# Altium footprint library Header2.PcbLib: 108 footprints (part 2 of 7)
Each footprint in its own frame and in the unit in brackets; x right, y up, seen from the top. Pads: shape width x height; smd on the part's side, far side on the other; paste and mask are expansions set on the pad; w line width, h text height; cw(c..) or ccw(c..) is an arc to the next point about the centre after c.
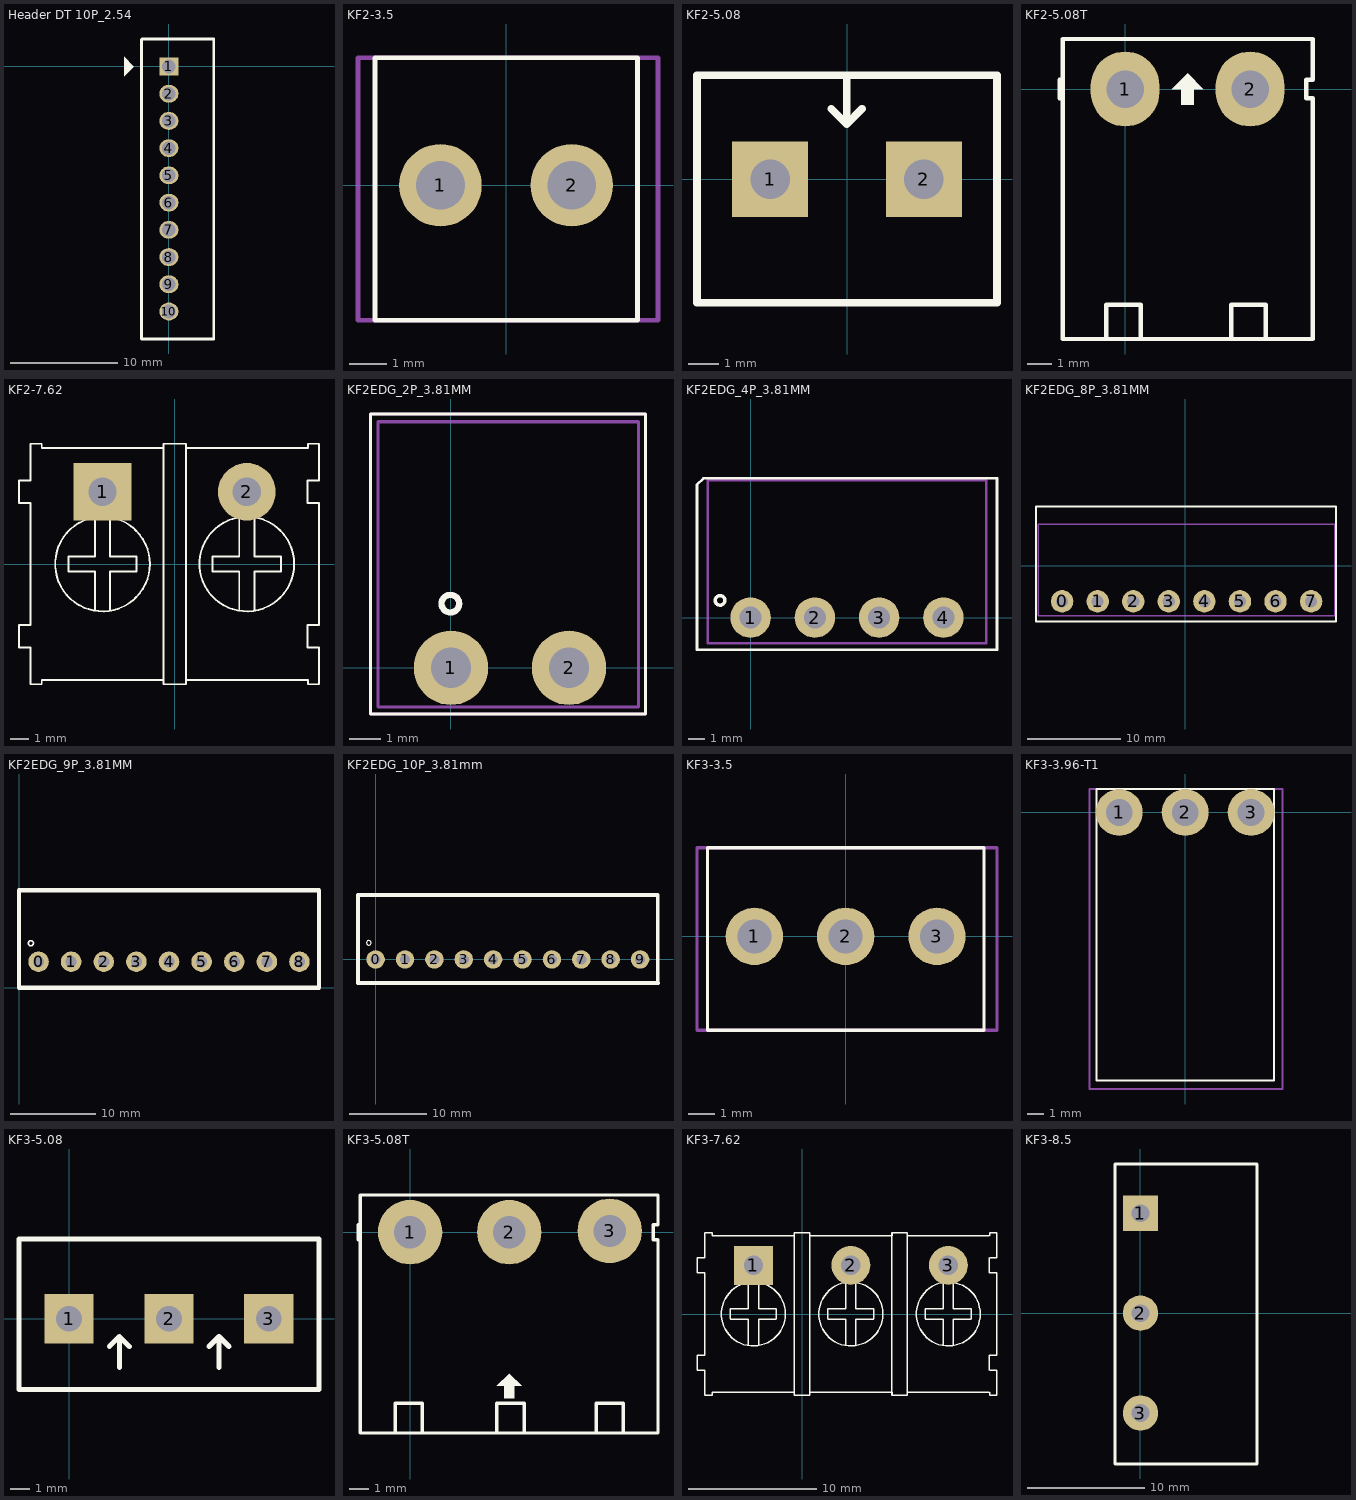
[diagram p1: the footprints below, top view; thin cyan lines are the x and y axes]

## Header DT 10P_2.54 [mil]
pads (10):
  rect 70x65 hole 50: 1(0,0)
  oval 70x65 hole 50: 2(0,-100) 3(0,-200) 4(0,-300) 5(0,-400) 6(0,-500) 7(0,-600) 8(0,-700) 9(0,-800) 10(0,-900)
Top Overlay:
  region: -164.5,35.5 -164.5,-35.5 -129.5,-0.5 -128.5,-0.5
  lines w10: -101,-1001 165,-1001 165,101 -99,101 -101,99 -101,-1001
3D body "31550.stp": height 550, standoff -115, extent -98,-1000 162,100

## KF2-3.5 [mm] "3,50mm - modular - blue - Horizontal wire entry - Pressure clamp - 8,4mm height - 02p"
height 8.4
pads (2):
  round 2.2 hole 1.3: 1(-1.75,0) 2(1.75,0)
Top Overlay:
  lines w0.127: -3.5,-3.6 -3.5,3.4 3.5,3.4 3.5,-3.6 -3.5,-3.6
Mechanical 13:
  lines w0.127: -3.95,-3.6 4.05,-3.6 4.05,3.4 -3.95,3.4 -3.95,-3.6
3D body "691103110002.stp": height 8.41, standoff -3.79, extent -3.95,-3.6 4.05,3.4

## KF2-5.08 [mm]
pads (2):
  rect 2.5x2.5 hole 1.3: 1(-2.54,0) 2(2.54,0)
Top Overlay:
  lines w0.254: -0.521,2.324 -0.013,1.816 ; -0.013,3.378 -0.013,1.816 ; 0.495,2.324 -0.013,1.816 ; -4.953,-4.077 -4.953,3.429 4.953,3.429 4.953,-4.077 -4.953,-4.077
3D body "SW3DPS-HDR1x2-MED-GREEN.STEP": height 10, standoff -4, extent -5,-4.071 5,3.429

## KF2-5.08T [mil] "Header 2, 2 pin, hight 300mil, Pin to Pin 200, Colour Green"
height 300
pads (2):
  oval 110x120 hole 60: 1(0,0) 2(200,0)
Top Overlay:
  region: 100,25 75,0 90,0 90,-25 110,-25 110,0 125,0
  lines w7: -105,-15 -105,15 ; -30,-400 -30,-345 25,-345 25,-400 ; 170,-400 170,-345 225,-345 225,-400 ; -100,-400 -100,80 -18.5,80 180.5,80 300,80 300,15 290,15 290,-15 300,-15 300,-400 -100,-400
3D body "SW3dPS-5EHDR_2P.STEP": height 333.51, standoff -157.48, extent -96.7,-399.22 297,73.22

## KF2-7.62 [mil]
pads (2):
  rect 120x120 hole 59.06 unplated: 1(-150,150)
  round 120 hole 59.06 unplated: 2(150,150)
Top Overlay:
  circle w4: c-150,0 r98.43
  circle w4: c150,0 r98.43
  lines w4: -323.62,-173.62 -323.62,-126.38 -300,-126.38 -300,126.38 -323.62,126.38 -323.62,173.62 ; -323,-173.62 -300,-173.62 -300,-250 -277,-250 ; -323,173.62 -300,173.62 -300,250 -277,250 ; -276.38,-250 -276.38,-241 -23.62,-241 -23.62,-250 23.62,-250 23.62,-241 276.38,-241 ; -276.38,250 -276.38,241 -23.62,241 -23.62,250 23.62,250 23.62,241 276.38,241 ; -221,-15.75 -165.75,-15.75 ; -221,-15 -221,16 ; -221,15.75 -165.75,15.75 ; -165.75,-97 -165.75,-16 ; -165.75,16 -165.75,97 ; -134.25,-97 -134.25,-16 ; -134.25,-15.75 -79,-15.75 ; -134.25,15.75 -79,15.75 ; -134.25,16 -134.25,97 ; -79,-15 -79,16 ; -23.62,-244 -23.62,245 ; 23.62,-244 23.62,245 ; 79,-15.75 134.25,-15.75 ; 79,-15 79,16 ; 79,15.75 134.25,15.75 ; 134.25,-97 134.25,-16 ; 134.25,16 134.25,97 ; 165.75,-97 165.75,-16 ; 165.75,-15.75 221,-15.75 ; 165.75,15.75 221,15.75 ; 165.75,16 165.75,97 ; 221,-15 221,16 ; 276.38,-173.62 276.38,-126.38 300,-126.38 300,126.38 276.38,126.38 276.38,173.62 ; 277,-241 277,-250 300,-250 300,-173.62 277,-173.62 ; 277,173.62 300,173.62 300,250 277,250 277,241
3D body "691313410002.stp": height 336.61, standoff -155.51, extent -300,-241.22 300,231.22

## KF2EDG_2P_3.81MM [mm]
pads (2):
  round 2.4 hole 1.3: 1(0,0) 2(3.81,0)
Top Overlay:
  circle w0.2: c-0.02,2.07 r0.284
  lines w0.1: -2.6,-1.49 -2.6,8.19 6.28,8.19 6.28,-1.49 -2.6,-1.49
Mechanical 1:
  lines w0.1: -2.36,-1.26 6.05,-1.26 6.05,7.94 -2.36,7.94 -2.36,-1.26
Mechanical 15:
  lines w0.1: -2.6,-1.49 -2.6,8.19 6.28,8.19 6.28,-1.49 -2.6,-1.49
  text "+" at 1.63,3.036 h1
3D body "15EDGRC-3.81-02P-14-00AH.STEP": height 7.2, standoff -3.4, extent -2.36,-1.26 6.05,7.94

## KF2EDG_4P_3.81MM [mm]
pads (4):
  round 2.4 hole 1.3: 1(0,0) 2(3.81,0) 3(7.62,0) 4(11.43,0)
Top Overlay:
  circle w0.2: c-1.808,1.016 r0.284
  lines w0.15: -3.175,-1.905 -3.175,7.874 -2.794,8.255 14.605,8.255 14.605,-1.905 -3.175,-1.905
Mechanical 1:
  lines w0.15: -2.54,-1.524 13.97,-1.524 13.97,8.128 -2.54,8.128 -2.54,-1.524
3D body "15EDGRC-3.81-04P-14-00AH.STEP": height 7.2, standoff -3.4, extent -2.3,-1.27 13.73,7.93

## KF2EDG_8P_3.81MM [mm]
pads (8):
  round 2.4 hole 1.3: 0(-13.208,-3.81) 1(-9.398,-3.81) 2(-5.588,-3.81) 3(-1.778,-3.81) 4(2.032,-3.81) 5(5.842,-3.81) 6(9.652,-3.81) 7(13.462,-3.81)
Top Overlay:
  lines w0.2: -16.002,-5.969 16.129,-5.969 16.129,6.35 8.096,6.35 -7.969,6.35 -16.002,6.35 -16.002,-5.969
Mechanical 1:
  lines w0.15: -15.748,-5.334 -15.748,4.445 16.002,4.445 16.002,-5.334 -15.748,-5.334
3D body "15EDGRC-3.81-08P-14-00AH.STEP": height 7.2, standoff -3.4, extent -15.508,-4.953 15.762,4.247

## KF2EDG_9P_3.81MM [mm]
pads (9):
  round 2.4 hole 1.3: 0(2.286,3.048) 1(6.096,3.048) 2(9.906,3.048) 3(13.716,3.048) 4(17.526,3.048) 5(21.336,3.048) 6(25.146,3.048) 7(28.956,3.048) 8(32.766,3.048)
Top Overlay:
  circle w0.15: c1.397,5.207 r0.3
  lines w0.5: 0,0 35.052,0 35.052,11.4 0,11.4 0,0
3D body "15EDGRC-3.81-09P-14-00AH.STEP": height 7.2, standoff -3.4, extent -0.014,1.849 35.066,11.049

## KF2EDG_10P_3.81mm [mm]
pads (10):
  round 2.4 hole 1.3: 0(0,0) 1(3.81,0) 2(7.62,0) 3(11.43,0) 4(15.24,0) 5(19.05,0) 6(22.86,0) 7(26.67,0) 8(30.48,0) 9(34.29,0)
Top Overlay:
  circle w0.15: c-0.889,2.159 r0.3
  lines w0.5: 36.576,-3.048 36.576,8.352 -2.286,8.352 -2.286,-3.048 36.614,-3.048
3D body "15EDGRC-3.81-10P-14-00AH.STEP": height 7.2, standoff -3.4, extent -2.3,-1.199 36.59,8.001

## KF3-3.5 [mm] "3,50mm - modular - blue - Horizontal wire entry - Pressure clamp - 8,4mm height - 03p"
height 8.4
pads (3):
  round 2.2 hole 1.3: 1(-3.5,0) 2(0,0) 3(3.5,0)
Top Overlay:
  lines w0.127: -5.3,-3.6 5.3,-3.6 5.3,3.4 -5.3,3.4 -5.3,-3.6
Mechanical 13:
  lines w0.127: -5.7,-3.6 5.8,-3.6 5.8,3.4 -5.7,3.4 -5.7,-3.6
3D body "691103110003.stp": height 8.41, standoff -3.79, extent -5.7,-3.6 5.8,3.4

## KF3-3.96-T1 [mm] "3,96mm - modular - blue - Horizontal wire entry - Pressure clamp - 10mm height - 03p"
height 10
pads (3):
  round 2.8 hole 1.6: 1(-3.937,0) 2(0,0) 3(3.937,0)
Top Overlay:
  lines w0.127: -5.3,-16.002 -5.3,1.397 5.3,1.397 5.3,-16.002 -5.3,-16.002
Mechanical 13:
  lines w0.127: -5.7,-16.51 -5.7,1.397 5.8,1.397 5.8,-16.51 -5.7,-16.51

## KF3-5.08 [mm]
pads (3):
  rect 2.5x2.5 hole 1.3: 1(0,0) 2(5.08,0) 3(10.147,0)
Top Overlay:
  lines w0.254: 2.045,-1.41 2.553,-0.902 ; 2.553,-2.464 2.553,-0.902 ; 3.061,-1.41 2.553,-0.902 ; 7.112,-1.41 7.62,-0.902 ; 7.62,-2.464 7.62,-0.902 ; 8.128,-1.41 7.62,-0.902 ; -2.54,-3.581 -2.54,4.064 12.7,4.064 12.7,-3.581 -2.54,-3.581
3D body "SW3DPS-HDR1x3-MED-GREEN.STEP": height 10, standoff -4, extent -2.42,-3.505 12.58,3.995

## KF3-5.08T [mil] "Header 3, 3 pin, hight 300mil, Pin to Pin 200, Colour Green"
height 300
pads (3):
  round 130 hole 65: 1(0,0) 2(200,0) 3(402.62,2.62)
Top Overlay:
  region: 200,-285 175,-310 190,-310 190,-335 210,-335 210,-310 225,-310
  lines w7: -105,-15 -105,15 ; -30,-400 -30,-345 25,-345 25,-400 ; 175,-400 175,-345 230,-345 230,-400 ; 375,-400 375,-345 430,-345 430,-400 ; -100,-405 -100,75 500,75 500,15 490,15 490,-15 500,-15 500,-405 -100,-405
3D body "User Library-BigHeader 5EHDR_1P.step": height 124.02, standoff -366.97, extent 299,-404.22 495.85,68.22
3D body "User Library-BigHeader 5EHDR_1P.step": height 124.02, standoff -366.97, extent 102,-404 298.85,68.44
3D body "User Library-BigHeader 5EHDR_1P.step": height 124.02, standoff -366.97, extent -95,-404 101.85,68.44

## KF3-7.62 [mil]
pads (3):
  rect 120x120 hole 59.06 unplated: 1(-150,150)
  round 120 hole 59.06 unplated: 2(150,150) 3(450,150)
Top Overlay:
  circle w4: c450,0 r98.43
  circle w4: c-150,0 r98.43
  circle w4: c150,0 r98.43
  lines w4: -323.62,-173.62 -323.62,-126.38 -300,-126.38 -300,126.38 -323.62,126.38 -323.62,173.62 ; -323,-173.62 -300,-173.62 -300,-250 -277,-250 ; -323,173.62 -300,173.62 -300,250 -277,250 ; -276.38,-250 -276.38,-241 -23.62,-241 -23.62,-250 23.62,-250 23.62,-241 276.38,-241 276.38,-250 323.62,-250 323.62,-241 576.38,-241 ; -276.38,250 -276.38,241 -23.62,241 -23.62,250 23.62,250 23.62,241 276.38,241 276.38,250 323.62,250 323.62,241 576.38,241 ; -221,-15.75 -165.75,-15.75 ; -221,-15 -221,16 ; -221,15.75 -165.75,15.75 ; -165.75,-97 -165.75,-16 ; -165.75,16 -165.75,97 ; -134.25,-97 -134.25,-16 ; -134.25,-15.75 -79,-15.75 ; -134.25,15.75 -79,15.75 ; -134.25,16 -134.25,97 ; -79,-15 -79,16 ; -23.62,-244 -23.62,245 ; 23.62,-244 23.62,245 ; 79,-15.75 134.25,-15.75 ; 79,-15 79,16 ; 79,15.75 134.25,15.75 ; 134.25,-97 134.25,-16 ; 134.25,16 134.25,97 ; 165.75,-97 165.75,-16 ; 165.75,-15.75 221,-15.75 ; 165.75,15.75 221,15.75 ; 165.75,16 165.75,97 ; 221,-15 221,16 ; 276.38,-244 276.38,245 ; 276.38,-173.62 276.38,-126.38 ; 276.38,126.38 276.38,173.62 ; 277,-241 277,-250 300,-250 ; 277,241 277,250 300,250 ; 323.62,-244 323.62,245 ; 379,-15.75 434.25,-15.75 ; 379,-15 379,16 ; 379,15.75 434.25,15.75 ; 434.25,-97 434.25,-16 ; 434.25,16 434.25,97 ; 465.75,-97 465.75,-16 ; 465.75,-15.75 521,-15.75 ; 465.75,15.75 521,15.75 ; 465.75,16 465.75,97 ; 521,-15 521,16 ; 576.38,-173.62 576.38,-126.38 600,-126.38 600,126.38 576.38,126.38 576.38,173.62 ; 577,-241 577,-250 600,-250 600,-173.62 577,-173.62 ; 577,173.62 600,173.62 600,250 577,250 577,241
3D body "691313410003.stp": height 336.61, standoff -155.51, extent -300.01,-241.23 599.99,231.22

## KF3-8.5 [mm]
pads (3):
  rect 3x3 hole 1.5: 1(0,8.509)
  round 3 hole 1.5: 2(0,0.009) 3(0,-8.491)
Top Overlay:
  lines w0.254: -2.159,-12.827 -2.159,12.7 9.906,12.7 9.906,-12.827 -2.159,-12.827
3D body "User Library-KF8500-3P.STEP": height 12.5, standoff -3.75, extent -2.159,-12.75 9.841,12.75